# Altium footprint library Hydrolib_pcb.PcbLib: 62 footprints (part 1 of 4)
Each footprint in its own frame and in the unit in brackets; x right, y up, seen from the top. Pads: shape width x height; smd on the part's side, far side on the other; paste and mask are expansions set on the pad; w line width, h text height; cw(c..) or ccw(c..) is an arc to the next point about the centre after c.
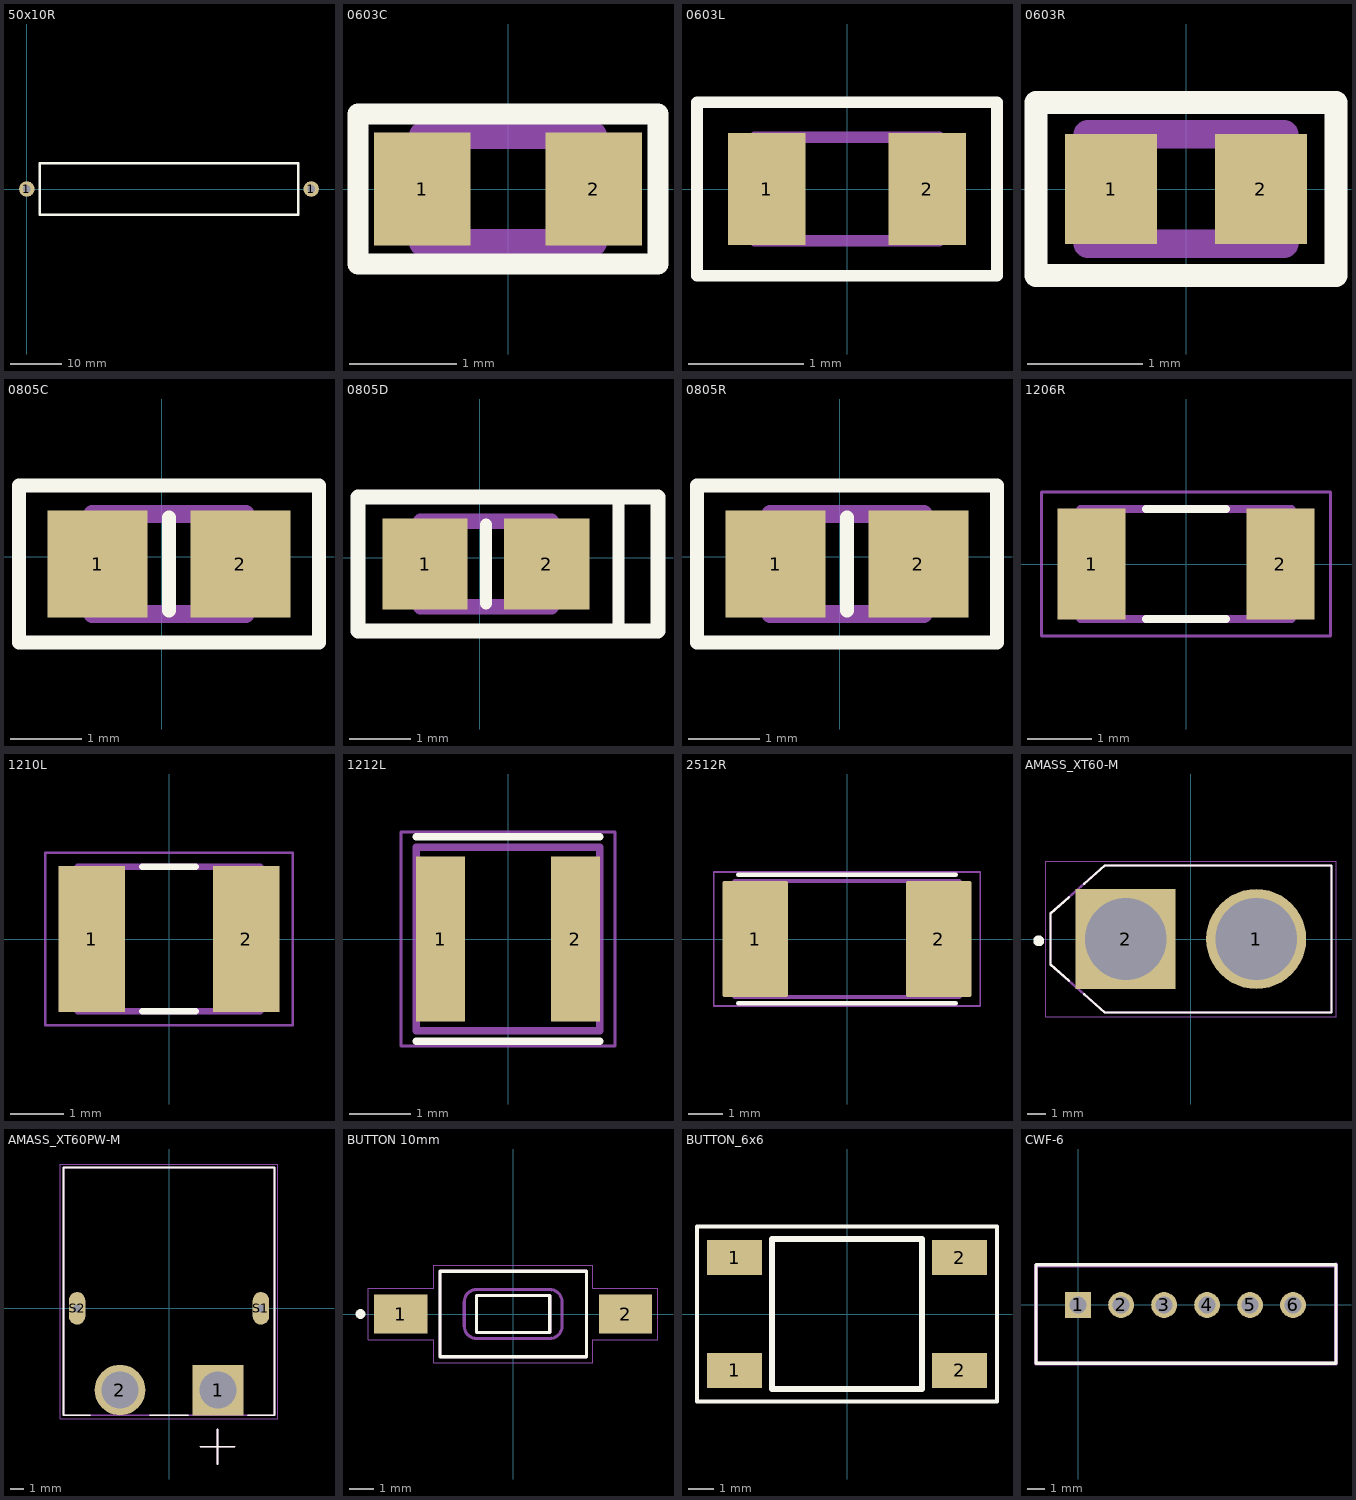
[diagram p0: the footprints below, top view; thin cyan lines are the x and y axes]

## 50x10R [mm]
pads (2):
  round 3 hole 1.5: 1(0,0) 1(55,0)
Top Overlay:
  lines w0.5: 2.5,-5 2.5,0 2.5,5 52.5,5 52.5,-5 2.5,-5

## 0603C [mm] "Chip Resistor, 2-Leads, Body 1,40x0,80mm, IPC Medium Density"
height 0.9
pads (2):
  rect 0.9x1.05 smd: 1(-0.8,0) 2(0.8,0)
Top Overlay:
  lines w0.2: -1.4,-0.7 -1.4,0.7 1.4,0.7 1.4,-0.7 -1.4,-0.7
Mechanical 4:
  lines w0.25: -0.8,-0.5 -0.8,0.5 0.8,0.5 0.8,-0.5 -0.8,-0.5
  text ".Designator" at -2.2,1.4 h2.15
3D body "CAPC-0603-T0.9-BN.stp": height 0.9, standoff 0, extent -0.85,-0.45 0.85,0.45

## 0603L [mm] "Chip Inductor, 2-Leads, Body 1,55x0,85mm, IPC Medium Density"
height 0.45
pads (2):
  rect 0.67x0.97 smd: 1(-0.695,0) 2(0.695,0)
Top Overlay:
  lines w0.1: -1.3,-0.75 -1.3,0.75 1.3,0.75 1.3,-0.75 -1.3,-0.75
Mechanical 4:
  lines w0.1: -0.8,-0.45 0.8,-0.45 ; -0.8,0.45 0.8,0.45
  text ".Designator" at -1.85,1.075 h2.15
Mechanical 13:
  lines w0.1: -0.8,-0.45 -0.8,0.45 ; 0.8,-0.45 0.8,0.45
3D body "0603L.step": height 0.45, standoff 0, extent -0.8,-0.45 0.8,0.45

## 0603R [mm] "Chip Resistor, 2-Leads, Body 1.60x0.85mm, IPC Medium Density"
height 0.5
pads (2):
  rect 0.8x0.95 smd: 1(-0.65,0) 2(0.65,0)
Top Overlay:
  lines w0.2: -1.3,-0.75 1.3,-0.75 1.3,0.75 -1.3,0.75 -1.3,-0.75
Mechanical 4:
  lines w0.25: -0.85,-0.475 0.85,-0.475 0.85,0.475 -0.85,0.475 -0.85,-0.475
  text ".Designator" at -2.4,1.4 h2.15
3D body "NTC-0603-T0.9.stp": height 0.9, standoff 0, extent -0.875,-0.475 0.875,0.475

## 0805C [mm]
pads (2):
  rect 1.4x1.5 smd: 1(-0.9,-0.1) 2(1.1,-0.1)
Top Overlay:
  lines w0.2: 0.1,-0.75 0.1,0.55 ; -2,-1.2 -2,1 2.2,1 2.2,-1.2 -2,-1.2
Mechanical 4:
  lines w0.25: -0.975,-0.8 1.175,-0.8 1.175,0.6 -0.975,0.6 -0.975,-0.8
  text ".Designator" at -3.4,1.6 h2.15
3D body "CAPC-0805-T1.35-BN.stp": height 1.38, standoff 0.03, extent -0.95,-0.8 1.15,0.55

## 0805D [mm]
pads (2):
  rect 1.4x1.5 smd: 1(-0.9,-0.1) 2(1.1,-0.1)
Top Overlay:
  lines w0.2: 0.1,-0.75 0.1,0.55 ; 2.275,1 2.275,-1.15 2.325,-1.2 2.925,-1.2
  lines w0.254: -2,-1.2 -2,1 2.925,1 2.925,-1.2 -2,-1.2
Mechanical 4:
  lines w0.25: -0.975,-0.8 1.175,-0.8 1.175,0.6 -0.975,0.6 -0.975,-0.8
3D body: height 0.7, standoff 0, extent -0.975,-0.8 1.175,0.6

## 0805R [mm]
pads (2):
  rect 1.4x1.5 smd: 1(-0.9,-0.1) 2(1.1,-0.1)
Top Overlay:
  lines w0.2: 0.1,-0.75 0.1,0.55 ; -2,-1.2 2.2,-1.2 2.2,1 -2,1 -2,-1.2
Mechanical 4:
  lines w0.25: -0.975,-0.8 -0.975,0.6 1.175,0.6 1.175,-0.8 -0.975,-0.8
  text ".Designator" at -1.4,1.8 h2.15
3D body "User Library-Chip Resistor2.step": height 0.5, standoff 0, extent -0.9,-0.7 1.1,0.5

## 1206R [mm]
pads (2):
  rect 1.05x1.72 smd: 1(-1.46,0) 2(1.46,0)
Top Overlay:
  lines w0.127: -0.62,-0.85 0.62,-0.85 ; -0.62,0.85 0.62,0.85
Mechanical 13:
  lines w0.127: -1.63,-0.85 -1.63,0.85 1.63,0.85 1.63,-0.85 -1.63,-0.85
Mechanical 15:
  lines w0.05: -2.235,-1.112 -2.235,1.112 2.235,1.112 2.235,-1.112 -2.235,-1.112
3D body "CRGCQ1206F39K.STEP": height 0.65, standoff 0, extent -1.55,-0.775 1.55,0.775

## 1210L [mm]
pads (2):
  rect 1.24x2.72 smd: 1(-1.44,0) 2(1.44,0)
Top Overlay:
  lines w0.127: -0.5,-1.35 0.5,-1.35 ; -0.5,1.35 0.5,1.35
Mechanical 13:
  lines w0.127: -1.7,-1.35 1.7,-1.35 1.7,1.35 -1.7,1.35 -1.7,-1.35
Mechanical 15:
  lines w0.05: -2.308,-1.608 2.308,-1.608 2.308,1.608 -2.308,1.608 -2.308,-1.608
3D body "1277AS-H-1R5M-P2--3DModel-STEP-231308.STEP": height 1.2, standoff 0, extent -1.6,-1.25 1.6,1.25

## 1212L [mm]
pads (2):
  rect 0.8x2.7 smd: 1(-1.1,0) 2(1.1,0)
Top Overlay:
  lines w0.127: -1.5,-1.67 1.5,-1.67 ; -1.5,1.67 1.5,1.67
Mechanical 13:
  lines w0.127: -1.5,-1.5 1.5,-1.5 1.5,1.5 -1.5,1.5 -1.5,-1.5
Mechanical 15:
  lines w0.05: -1.75,-1.75 -1.75,1.75 1.75,1.75 1.75,-1.75 -1.75,-1.75
3D body "LQH3NPH560MMEL.STEP": height 1.5, standoff 0, extent -1.5,-1.5 1.5,1.5

## 2512R [mm]
pads (2):
  rrect7% 1.9x3.37 smd: 1(-2.66,0) 2(2.66,0)
Top Overlay:
  lines w0.127: -3.15,-1.865 3.15,-1.865 ; -3.15,1.865 3.15,1.865
Mechanical 13:
  lines w0.127: -3.25,-1.68 -3.25,1.68 3.25,1.68 3.25,-1.68 -3.25,-1.68
Mechanical 15:
  lines w0.05: -3.86,-1.94 -3.86,1.94 3.86,1.94 3.86,-1.94 -3.86,-1.94
3D body "3-2176058-0.STEP": height 0.65, standoff 0, extent -3.175,-1.6 3.175,1.6

## AMASS_XT60-M [mm]
pads (2):
  round 5.516 hole 4.5: 1(3.6,0)
  rect 5.516x5.516 hole 4.5: 2(-3.6,0)
Top Overlay:
  circle w0.3: c-8.4,-0.1 r0.15
  lines w0.127: -6.73,-2.3 -7.75,-1.4 -7.75,1.4 -6.73,2.3 ; -5.88,-3.05 -4.75,-4.05 7.75,-4.05 7.75,4.05 -4.75,4.05 -5.88,3.05
Mechanical 13:
  lines w0.127: -7.75,-1.4 -7.75,1.4 -4.75,4.05 7.75,4.05 7.75,-4.05 -4.75,-4.05 -7.75,-1.4
Mechanical 15:
  lines w0.05: -8,-4.3 -8,4.3 8,4.3 8,-4.3 -8,-4.3
3D body "XT60-M--3DModel-STEP-56544.STEP": height 16, standoff -4.5, extent -7.369,-3.81 8.131,4.29

## AMASS_XT60PW-M [mm]
height 8.4
pads (4):
  rect 3.716x3.716 / inner round 3.716 / far side rect 3.716x3.716 hole 2.7: 1(3.6,-6)
  round 3.716 hole 2.7: 2(-3.6,-6)
  oval 1.2x2.4 hole 0.6 square: S1(6.75,0) S2(-6.75,0)
Top Overlay:
  lines w0.127: -5.778,-7.85 -7.75,-7.85 -7.75,10.35 7.75,10.35 7.75,-7.85 5.778,-7.85 ; -1.422,-7.85 1.422,-7.85 ; 2.29,-10.16 3.56,-10.16 ; 3.56,-11.43 3.56,-10.16 ; 3.56,-8.89 3.56,-10.16 ; 4.83,-10.16 3.56,-10.16
Mechanical 13:
  lines w0.127: 2.29,-10.16 3.56,-10.16 ; 3.56,-11.43 3.56,-10.16 ; 3.56,-8.89 3.56,-10.16 ; 4.83,-10.16 3.56,-10.16 ; -7.75,-7.85 7.75,-7.85 7.75,10.35 -7.75,10.35 -7.75,-7.85
Mechanical 15:
  lines w0.05: -8,-8.11 8,-8.11 8,10.6 -8,10.6 -8,-8.11
3D body "step_temp.STEP": height 8.4, standoff -2.55, extent -7.75,-7.85 7.75,10.35

## BUTTON 10mm [mm]
pads (2):
  rect 2.18x1.6 smd: 1(-4.6,0) 2(4.6,0)
Top Overlay:
  circle w0.2: c-6.25,0 r0.1
  lines w0.127: -3,-1.75 3,-1.75 3,1.75 -3,1.75 -3,-1.75 ; -1.5,-0.75 1.5,-0.75 1.5,0.75 -1.5,0.75 -1.5,-0.75
Mechanical 13:
  circle w0.2: c-4.6,0 r0.1
  lines w0.127: -3,-1.75 3,-1.75 3,1.75 -3,1.75 -3,-1.75 ; -2,-0.5 ccw(c-1.5,-0.5) -1.5,-1 1.5,-1 ccw(c1.5,-0.5) 2,-0.5 2,0.5 ccw(c1.5,0.5) 1.5,1 -1.5,1 ccw(c-1.5,0.5) -2,0.5 -2,-0.5 ; -1.5,-0.75 1.5,-0.75 1.5,0.75 -1.5,0.75 -1.5,-0.75
Mechanical 15:
  lines w0.05: -5.93,-1.05 -5.93,1.05 -3.25,1.05 -3.25,2 3.25,2 3.25,1.05 5.93,1.05 5.93,-1.05 3.25,-1.05 3.25,-2 -3.25,-2 -3.25,-1.05 -5.93,-1.05
3D body "147873-1.stp": height 5.2, standoff 0, extent -3.4,-1.75 3.4,1.75

## BUTTON_6x6 [mm]
pads (4):
  rect 2.2x1.4 smd: 1(-4.5,-2.25) 1(-4.5,2.25) 2(4.5,-2.25) 2(4.5,2.25)
Top Overlay:
  lines w0.15: -6,-3.5 -6,3.5 6,3.5 6,-3.5 -6,-3.5
  lines w0.254: -3,-3 3,-3 3,3 -3,3 -3,-3
3D body "TL3301FF160QG--3DModel-STEP-418109.STEP": height 7.1, standoff 0, extent -5,-3 5,3

## CWF-6 [mm]
pads (6):
  rect 1.5x1.5 hole 1: 1(0,0)
  round 1.5 hole 1: 2(2.5,0) 3(5,0) 4(7.5,0) 5(10,0) 6(12.5,0)
Top Overlay:
  lines w0.2: -2.45,-3.4 15,-3.4 15,2.35 -2.45,2.35 -2.45,-3.4
Mechanical 4:
  lines w0.25: 15,2.3 -2.45,2.3 -2.45,-3.4 15,-3.4 15,2.35
  text ".Designator" at 0.7,-2 h2.15
3D body "User Library-CWF-6.STEP": height 7, standoff -3.5, extent -2.5,-3.55 15,2.2